# Altium footprint library 2019-12-07_12-05-20.PcbLib: 3 footprints
Each footprint in its own frame and in the unit in brackets; x right, y up, seen from the top. Pads: shape width x height; smd on the part's side, far side on the other; paste and mask are expansions set on the pad; w line width, h text height; cw(c..) or ccw(c..) is an arc to the next point about the centre after c.
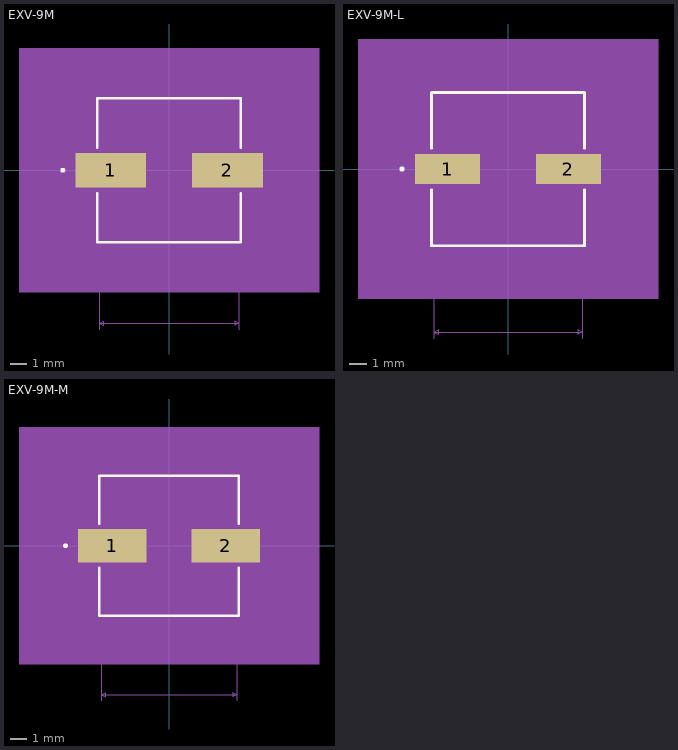
[diagram p0: the footprints below, top view; thin cyan lines are the x and y axes]

## EXV-9M [mil]
pads (2):
  rect 170x83 smd paste+0 mask+0: 1(-140,0) 2(140,0)
Top Overlay:
  circle w6: c-255,0 r3
  lines w6: -172.5,-54.6 -172.5,-172.5 172.5,-172.5 172.5,-54.6 ; -172.5,54.6 -172.5,172.5 172.5,172.5 172.5,54.6
Mechanical 5:
  region: 360,-292.5 -360,-292.5 -360,292.5 360,292.5
Mechanical 7:
  lines w1: -282.5,-167.5 -167.5,-167.5 -167.5,-382.5 ; -282.5,167.5 -167.5,167.5 ; -247,-267.5 -197,-267.5 ; -197,-282.5 -197,-51.5 ; -197,51.5 -197,282.5 ; -55,-282.5 -55,-31.5 ; -5,-267.5 -55,-267.5 ; 167.5,-382.5 167.5,-167.5 ; 197,51.5 197,282.5 ; 235,-21.5 340,-21.5 ; 235,21.5 340,21.5 ; 325,-71.5 325,-21.5 ; 325,71.5 325,21.5 ; -267.5,-167.5 -267.5,167.5 ; -267.5,-167.5 -272.5,-157.5 -262.5,-157.5 -267.5,-167.5 ; -267.5,167.5 -272.5,157.5 -262.5,157.5 -267.5,167.5 ; -197,-267.5 -207,-262.5 -207,-272.5 -197,-267.5 ; -197,267.5 197,267.5 ; -197,267.5 -187,272.5 -187,262.5 -197,267.5 ; -167.5,-367.5 167.5,-367.5 ; -167.5,-367.5 -157.5,-362.5 -157.5,-372.5 -167.5,-367.5 ; -55,-267.5 -45,-262.5 -45,-272.5 -55,-267.5 ; 167.5,-367.5 157.5,-362.5 157.5,-372.5 167.5,-367.5 ; 197,267.5 187,272.5 187,262.5 197,267.5 ; 325,-21.5 320,-31.5 330,-31.5 325,-21.5 ; 325,21.5 320,31.5 330,31.5 325,21.5
  text "Default Padstyle: RX170Y83D0T" at -362.5,-433.5 h50
  text "Alternate 1 Padstyle: OX60Y90D30P" at -412.5,-533.5 h50
  text "Alternate 2 Padstyle: OX90Y60D30P" at -412.5,-633.5 h50
  text "0.043in/1.092mm" at 345,-12.5 h25
  text "0.394in/10.008mm" at -100,287.5 h25
  text "0.335in/8.509mm" at -475,-12.5 h25
  text "0.142in/3.607mm" at -219.75,-312.5 h25
  text "0.335in/8.509mm" at -93.75,-412.5 h25
Mechanical 13:
  circle w0: c-147.5,0 r3
  lines w1: -167.5,-83.75 -83.75,-167.5 ; -167.5,83.75 -83.75,167.5 ; -167.5,-167.5 167.5,-167.5 167.5,167.5 -167.5,167.5 -167.5,-167.5
Mechanical 15:
  region: -177.5,-51.5 -235,-51.5 -235,51.5 -177.5,51.5 -177.5,177.5 177.5,177.5 177.5,51.5 235,51.5 235,-51.5 177.5,-51.5 177.5,-177.5 -177.5,-177.5
  lines w6: -235,-51.5 -235,51.5 -177.5,51.5 -177.5,177.5 177.5,177.5 177.5,51.5 235,51.5 235,-51.5 177.5,-51.5 177.5,-177.5 -177.5,-177.5 -177.5,-51.5 -235,-51.5
3D body: height 10, standoff 0, extent 0,0 10,10

## EXV-9M-L [mil]
pads (2):
  rect 146x67 smd paste+0 mask+0: 1(-136,0) 2(136,0)
Top Overlay:
  circle w6: c-239,0 r3
  lines w6: -172.5,-46.6 -172.5,-172.5 172.5,-172.5 172.5,-46.6 ; -172.5,46.6 -172.5,172.5 172.5,172.5 172.5,46.6
Mechanical 5:
  region: 338,-292.5 -338,-292.5 -338,292.5 338,292.5
Mechanical 7:
  lines w1: -282.5,-167.5 -167.5,-167.5 -167.5,-382.5 ; -282.5,167.5 -167.5,167.5 ; -247,-267.5 -197,-267.5 ; -197,-282.5 -197,-43.5 ; -197,43.5 -197,282.5 ; -55,-282.5 -55,-23.5 ; -5,-267.5 -55,-267.5 ; 167.5,-382.5 167.5,-167.5 ; 197,43.5 197,282.5 ; 219,-21.5 324,-21.5 ; 219,21.5 324,21.5 ; 309,-71.5 309,-21.5 ; 309,71.5 309,21.5 ; -267.5,-167.5 -267.5,167.5 ; -267.5,-167.5 -272.5,-157.5 -262.5,-157.5 -267.5,-167.5 ; -267.5,167.5 -272.5,157.5 -262.5,157.5 -267.5,167.5 ; -197,-267.5 -207,-262.5 -207,-272.5 -197,-267.5 ; -197,267.5 197,267.5 ; -197,267.5 -187,272.5 -187,262.5 -197,267.5 ; -167.5,-367.5 167.5,-367.5 ; -167.5,-367.5 -157.5,-362.5 -157.5,-372.5 -167.5,-367.5 ; -55,-267.5 -45,-262.5 -45,-272.5 -55,-267.5 ; 167.5,-367.5 157.5,-362.5 157.5,-372.5 167.5,-367.5 ; 197,267.5 187,272.5 187,262.5 197,267.5 ; 309,-21.5 304,-31.5 314,-31.5 309,-21.5 ; 309,21.5 304,31.5 314,31.5 309,21.5
  text "Default Padstyle: RX146Y67D0T" at -362.5,-441.5 h50
  text "Alternate 1 Padstyle: OX60Y90D30P" at -412.5,-541.5 h50
  text "Alternate 2 Padstyle: OX90Y60D30P" at -412.5,-641.5 h50
  text "0.043in/1.092mm" at 329,-12.5 h25
  text "0.394in/10.008mm" at -100,287.5 h25
  text "0.335in/8.509mm" at -475,-12.5 h25
  text "0.142in/3.607mm" at -219.75,-312.5 h25
  text "0.335in/8.509mm" at -93.75,-412.5 h25
Mechanical 13:
  circle w0: c-147.5,0 r3
  lines w1: -167.5,-83.75 -83.75,-167.5 ; -167.5,83.75 -83.75,167.5 ; -167.5,-167.5 167.5,-167.5 167.5,167.5 -167.5,167.5 -167.5,-167.5
Mechanical 15:
  region: -171.5,-37.5 -213,-37.5 -213,37.5 -171.5,37.5 -171.5,171.5 171.5,171.5 171.5,37.5 213,37.5 213,-37.5 171.5,-37.5 171.5,-171.5 -171.5,-171.5
  lines w6: -213,-37.5 -213,37.5 -171.5,37.5 -171.5,171.5 171.5,171.5 171.5,37.5 213,37.5 213,-37.5 171.5,-37.5 171.5,-171.5 -171.5,-171.5 -171.5,-37.5 -213,-37.5
3D body: height 10, standoff 0, extent 0,0 10,10

## EXV-9M-M [mil]
pads (2):
  rect 170x83 smd paste+0 mask+0: 1(-140,0) 2(140,0)
Top Overlay:
  circle w6: c-255,0 r3
  lines w6: -172.5,-54.6 -172.5,-172.5 172.5,-172.5 172.5,-54.6 ; -172.5,54.6 -172.5,172.5 172.5,172.5 172.5,54.6
Mechanical 5:
  region: 370,-292.5 -370,-292.5 -370,292.5 370,292.5
Mechanical 7:
  lines w1: -282.5,-167.5 -167.5,-167.5 -167.5,-382.5 ; -282.5,167.5 -167.5,167.5 ; -247,-267.5 -197,-267.5 ; -197,-282.5 -197,-51.5 ; -197,51.5 -197,282.5 ; -55,-282.5 -55,-31.5 ; -5,-267.5 -55,-267.5 ; 167.5,-382.5 167.5,-167.5 ; 197,51.5 197,282.5 ; 235,-21.5 340,-21.5 ; 235,21.5 340,21.5 ; 325,-71.5 325,-21.5 ; 325,71.5 325,21.5 ; -267.5,-167.5 -267.5,167.5 ; -267.5,-167.5 -272.5,-157.5 -262.5,-157.5 -267.5,-167.5 ; -267.5,167.5 -272.5,157.5 -262.5,157.5 -267.5,167.5 ; -197,-267.5 -207,-262.5 -207,-272.5 -197,-267.5 ; -197,267.5 197,267.5 ; -197,267.5 -187,272.5 -187,262.5 -197,267.5 ; -167.5,-367.5 167.5,-367.5 ; -167.5,-367.5 -157.5,-362.5 -157.5,-372.5 -167.5,-367.5 ; -55,-267.5 -45,-262.5 -45,-272.5 -55,-267.5 ; 167.5,-367.5 157.5,-362.5 157.5,-372.5 167.5,-367.5 ; 197,267.5 187,272.5 187,262.5 197,267.5 ; 325,-21.5 320,-31.5 330,-31.5 325,-21.5 ; 325,21.5 320,31.5 330,31.5 325,21.5
  text "Default Padstyle: RX170Y83D0T" at -362.5,-433.5 h50
  text "Alternate 1 Padstyle: OX60Y90D30P" at -412.5,-533.5 h50
  text "Alternate 2 Padstyle: OX90Y60D30P" at -412.5,-633.5 h50
  text "0.043in/1.092mm" at 345,-12.5 h25
  text "0.394in/10.008mm" at -100,287.5 h25
  text "0.335in/8.509mm" at -475,-12.5 h25
  text "0.142in/3.607mm" at -219.75,-312.5 h25
  text "0.335in/8.509mm" at -93.75,-412.5 h25
Mechanical 13:
  circle w0: c-147.5,0 r3
  lines w1: -167.5,-83.75 -83.75,-167.5 ; -167.5,83.75 -83.75,167.5 ; -167.5,-167.5 167.5,-167.5 167.5,167.5 -167.5,167.5 -167.5,-167.5
Mechanical 15:
  region: -187.5,-61.5 -245,-61.5 -245,61.5 -187.5,61.5 -187.5,187.5 187.5,187.5 187.5,61.5 245,61.5 245,-61.5 187.5,-61.5 187.5,-187.5 -187.5,-187.5
  lines w6: -245,-61.5 -245,61.5 -187.5,61.5 -187.5,187.5 187.5,187.5 187.5,61.5 245,61.5 245,-61.5 187.5,-61.5 187.5,-187.5 -187.5,-187.5 -187.5,-61.5 -245,-61.5
3D body: height 10, standoff 0, extent 0,0 10,10